# Altium footprint library DF2S6P2FS,L3M.PcbLib: 3 footprints
Each footprint in its own frame and in the unit in brackets; x right, y up, seen from the top. Pads: shape width x height; smd on the part's side, far side on the other; paste and mask are expansions set on the pad; w line width, h text height; cw(c..) or ccw(c..) is an arc to the next point about the centre after c.
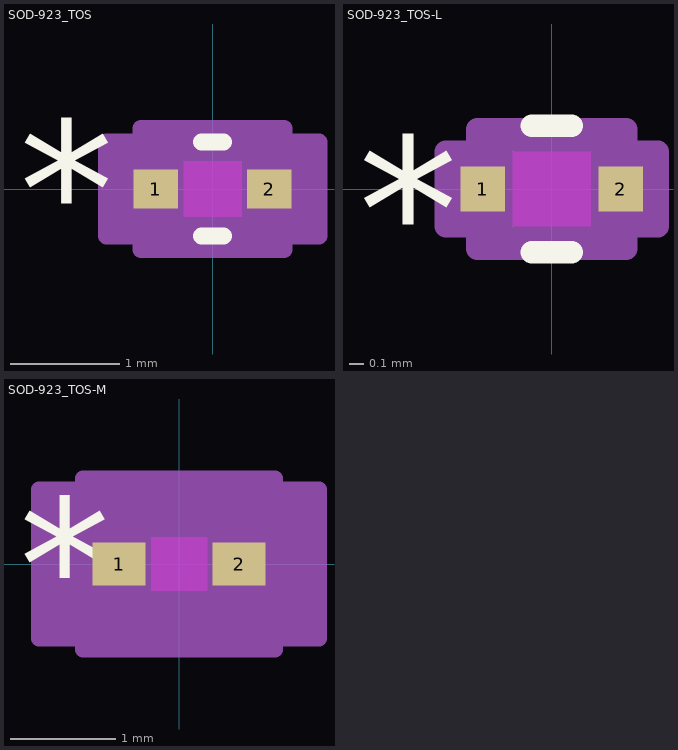
[diagram p0: the footprints below, top view; thin cyan lines are the x and y axes]

## SOD-923_TOS [mil]
pads (2):
  rect 16x14 smd paste+0 mask+0: 1(-20.5,0) 2(20.5,0)
Top Layer keep-out:
  region: -10.5,-10 -10.5,10 10.5,10 10.5,-10
Top Overlay:
  lines w6: -4.04,-17 4.04,-17 ; -4.04,17 4.04,17
  text "*" at -70,-25 h50
Keep-Out Layer:
  region: -10.5,-10 -10.5,10 10.5,10 10.5,-10
Mechanical 13:
  lines w1: -16,-6 -10,-12 ; -16,6 -10,12 ; -20.5,-7 -20.5,7 -16,7 -16,-7 -20.5,-7 ; -16,-12 16,-12 16,12 -16,12 -16,-12 ; 16,-7 16,7 20.5,7 20.5,-7 16,-7
  text "*" at -18.5,-25 h50
Mechanical 15:
  region: -26,-17 -38.5,-17 -38.5,17 -26,17 -26,22 26,22 26,17 38.5,17 38.5,-17 26,-17 26,-22 -26,-22
  lines w6: -38.5,-17 -38.5,17 -26,17 -26,22 26,22 26,17 38.5,17 38.5,-17 26,-17 26,-22 -26,-22 -26,-17 -38.5,-17
3D body "SOD-923_TOS.step": height 18.27, standoff 0, extent -20.51,-12.01 20.51,12.01

## SOD-923_TOS-L [mil]
pads (2):
  rect 12x12 smd paste+0 mask+0: 1(-18.5,0) 2(18.5,0)
Top Layer keep-out:
  region: -10.5,-10 -10.5,10 10.5,10 10.5,-10
Top Overlay:
  lines w6: -5.39,-17 5.39,-17 ; -5.39,17 5.39,17
  text ".Designator" at -137.5,-25 h50
  text "*" at -52,-25 h50
Keep-Out Layer:
  region: -10.5,-10 -10.5,10 10.5,10 10.5,-10
Mechanical 13:
  lines w1: -16,-6 -10,-12 ; -16,6 -10,12 ; -20.5,-7 -20.5,7 -16,7 -16,-7 -20.5,-7 ; -16,-12 16,-12 16,12 -16,12 -16,-12 ; 16,-7 16,7 20.5,7 20.5,-7 16,-7
  text "*" at -18.5,-25 h50
  text ".Designator" at -137.5,-25 h50
Mechanical 15:
  region: -20,-10 -28.5,-10 -28.5,10 -20,10 -20,16 20,16 20,10 28.5,10 28.5,-10 20,-10 20,-16 -20,-16
  lines w6: -28.5,-10 -28.5,10 -20,10 -20,16 20,16 20,10 28.5,10 28.5,-10 20,-10 20,-16 -20,-16 -20,-10 -28.5,-10
3D body "SOD-923_TOS.step": height 18.27, standoff 0, extent -20.51,-12.01 20.51,12.01

## SOD-923_TOS-M [mil]
pads (2):
  rect 20x16 smd paste+0 mask+0: 1(-22.5,0) 2(22.5,0)
Top Layer keep-out:
  region: -10.5,-10 -10.5,10 10.5,10 10.5,-10
Top Overlay:
  text ".Designator" at -137.5,-25 h50
  text "*" at -60,-25 h50
Keep-Out Layer:
  region: -10.5,-10 -10.5,10 10.5,10 10.5,-10
Mechanical 13:
  lines w1: -16,-6 -10,-12 ; -16,6 -10,12 ; -20.5,-7 -20.5,7 -16,7 -16,-7 -20.5,-7 ; -16,-12 16,-12 16,12 -16,12 -16,-12 ; 16,-7 16,7 20.5,7 20.5,-7 16,-7
  text "*" at -18.5,-25 h50
  text ".Designator" at -137.5,-25 h50
Mechanical 15:
  region: -36,-28 -52.5,-28 -52.5,28 -36,28 -36,32 36,32 36,28 52.5,28 52.5,-28 36,-28 36,-32 -36,-32
  lines w6: -52.5,-28 -52.5,28 -36,28 -36,32 36,32 36,28 52.5,28 52.5,-28 36,-28 36,-32 -36,-32 -36,-28 -52.5,-28
3D body "SOD-923_TOS.step": height 18.27, standoff 0, extent -20.51,-12.01 20.51,12.01